# Altium schematic symbol library 6Cnts-D.SchLib: 1 symbol
Pins are listed as number, name and electrical type; pins without a type are passive.

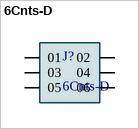
[diagram p0: symbol 6Cnts-D]

## 6Cnts-D
designator J?
MP: MTSW-103-22-S-D-430; Package: None; Price: None; Value: *; Availability: Unavailable
footprint 6Cnts-D
footprint 6Cnts-D-SMD
pins: 01, 02, 03, 04, 05, 06